# Altium footprint library RPI-Router.PcbLib: 49 footprints (part 1 of 4)
Each footprint in its own frame and in the unit in brackets; x right, y up, seen from the top. Pads: shape width x height; smd on the part's side, far side on the other; paste and mask are expansions set on the pad; w line width, h text height; cw(c..) or ccw(c..) is an arc to the next point about the centre after c.
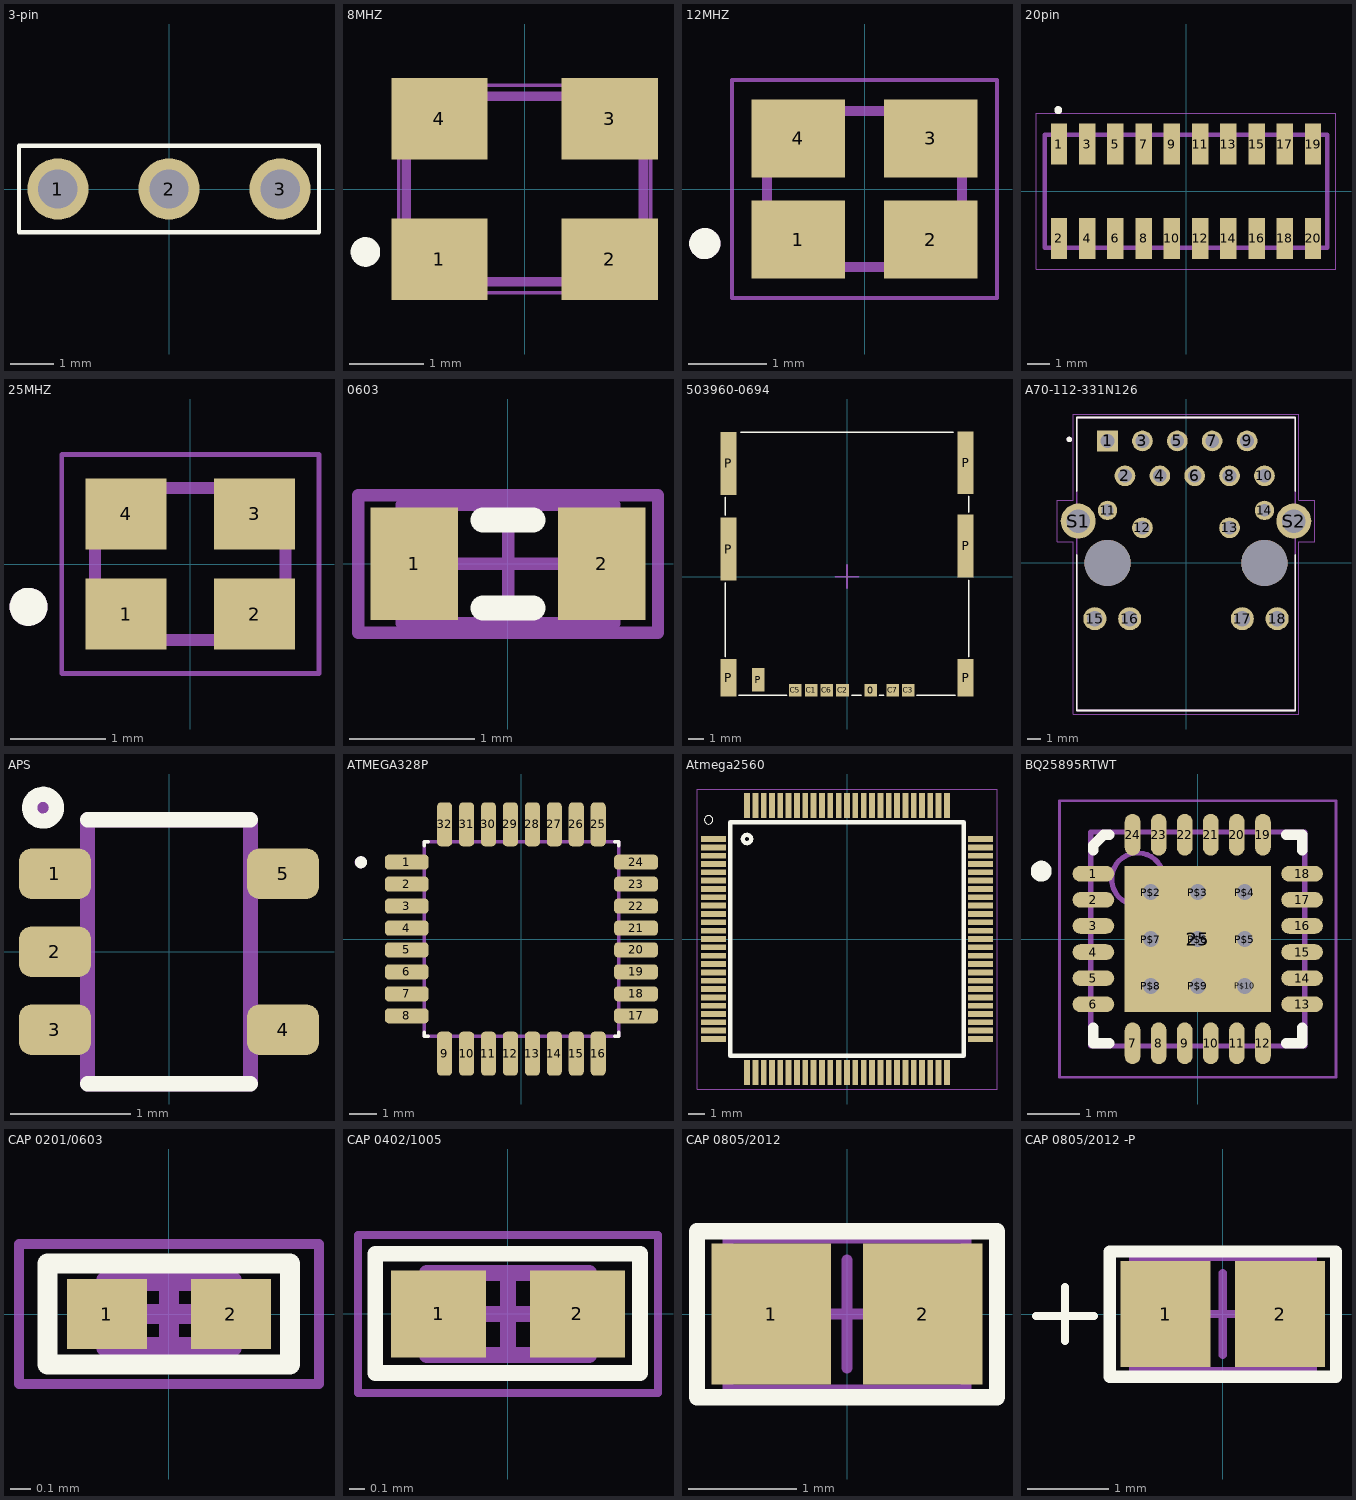
[diagram p0: the footprints below, top view; thin cyan lines are the x and y axes]

## 3-pin [mm]
pads (3):
  round 1.4 hole 0.9: 1(-2.54,0) 2(0,0) 3(2.54,0)
Top Overlay:
  lines w0.1: -3.429,-0.991 3.429,-0.991 3.429,0.991 -3.429,0.991 -3.429,-0.991
3D body "c-87220-3-k-3d.stp": height 10.48, standoff -3.06, extent -3.607,-1.168 3.607,1.168

## 8MHZ [mm]
pads (4):
  rect 1.3x1.1 smd: 1(-1.15,-0.95) 2(1.15,-0.95) 3(1.15,0.95) 4(-1.15,0.95)
Top Overlay:
  circle w0.2: c-2.15,-0.85 r0.1
Mechanical 13:
  lines w0.127: -1.6,-1.25 1.6,-1.25 1.6,1.25 -1.6,1.25 -1.6,-1.25
Mechanical 15:
  lines w0.05: -1.7,-1.4 1.7,-1.4 1.7,1.4 -1.7,1.4 -1.7,-1.4
3D body: height 0.5, standoff 0, extent -1.6,-1.25 1.6,1.25

## 12MHZ [mm]
pads (4):
  rect 1.2x1 smd: 1(-0.85,-0.65) 2(0.85,-0.65) 3(0.85,0.65) 4(-0.85,0.65)
Top Overlay:
  circle w0.2: c-2.05,-0.7 r0.1
Mechanical 13:
  circle w0.2: c-2.05,-0.7 r0.1
  lines w0.127: -1.25,-1 1.25,-1 1.25,1 -1.25,1 -1.25,-1
Mechanical 15:
  lines w0.05: -1.7,-1.4 1.7,-1.4 1.7,1.4 -1.7,1.4 -1.7,-1.4
3D body: height 0.5, standoff 0, extent -1.25,-1 1.25,1

## 20pin [mm]
pads (20):
  rect 0.74x1.85 smd: 1(-5.715,2.125) 2(-5.715,-2.125) 3(-4.445,2.125) 4(-4.445,-2.125) 5(-3.175,2.125) 6(-3.175,-2.125) 7(-1.905,2.125) 8(-1.905,-2.125) 9(-0.635,2.125) 10(-0.635,-2.125) 11(0.635,2.125) 12(0.635,-2.125) 13(1.905,2.125) 14(1.905,-2.125) 15(3.175,2.125) 16(3.175,-2.125) 17(4.445,2.125) 18(4.445,-2.125) 19(5.715,2.125) 20(5.715,-2.125)
Top Overlay:
  circle w0.254: c-5.75,3.65 r0.05
Mechanical 13:
  lines w0.2: -6.35,-2.55 6.35,-2.55 6.35,2.55 -6.35,2.55 -6.35,-2.55
Mechanical 15:
  lines w0.05: -6.75,-3.5 6.75,-3.5 6.75,3.5 -6.75,3.5 -6.75,-3.5
3D body "_ _ _B102VWQS-RC.STEP": height 5, standoff 0, extent -6.35,-2.5 6.35,2.6

## 25MHZ [mm]
pads (4):
  rect 0.85x0.75 smd: 1(-0.675,-0.525) 2(0.675,-0.525) 3(0.675,0.525) 4(-0.675,0.525)
Top Overlay:
  circle w0.2: c-1.7,-0.45 r0.1
Mechanical 13:
  circle w0.2: c-1.7,-0.45 r0.1
  lines w0.127: -1,-0.8 -1,0.8 1,0.8 1,-0.8 -1,-0.8
Mechanical 15:
  lines w0.05: -1.35,-1.15 -1.35,1.15 1.35,1.15 1.35,-1.15 -1.35,-1.15
3D body: height 1, standoff 0, extent -1,-0.8 1,0.8

## 0603 [mm]
pads (2):
  rect 0.7x0.9 smd: 1(-0.75,0) 2(0.75,0)
Top Overlay:
  lines w0.2: -0.2,-0.35 0.2,-0.35 ; -0.2,0.35 0.2,0.35
Mechanical 13:
  lines w0.1: -0.85,-0.475 0.85,-0.475 0.85,0.475 -0.85,0.475 -0.85,-0.475
Mechanical 15:
  lines w0.1: -0.475,0 0.475,0 ; 0,-0.475 0,0.475 ; -1.2,-0.55 1.2,-0.55 1.2,0.55 -1.2,0.55 -1.2,-0.55
3D body "User Library-RES_0603L.STEP": height 0.44, standoff -0.03, extent -0.8,-0.406 0.8,0.394

## 503960-0694 [mm] "1.42mm Height micro-SIM Card Connector, 1.00mm Pitch, Push-Push, SMT, Normal Mount, with Detect Switch, 6 Circuits"
pads (14):
  rect 0.8x0.8 smd: 0(1.5,-7.25) C1(-2.285,-7.25) C2(-0.285,-7.25) C3(3.905,-7.25) C5(-3.285,-7.25) C6(-1.285,-7.25) C7(2.905,-7.25)
  rect 1x2.4 smd: P(-7.55,-6.45) P(7.55,-6.45)
  rect 1x4 smd: P(-7.55,1.75) P(-7.55,7.2) P(7.55,1.95) P(7.55,7.25)
  rect 0.8x1.5 smd: P(-5.65,-6.579)
Top Overlay:
  lines w0.1: -7.75,-5.1 -7.75,-0.4 ; -7.75,3.9 -7.75,5.05 ; -6.9,-7.55 -3.85,-7.55 ; -6.75,9.2 6.75,9.2 ; 0.3,-7.55 0.9,-7.55 ; 2.05,-7.55 2.35,-7.55 ; 4.45,-7.55 6.9,-7.55 ; 7.75,-5.1 7.75,-0.25 ; 7.75,4.1 7.75,5.1
Mechanical 3:
  lines w0.1: -0.75,0 0.75,0 ; 0,-0.75 0,0 0,0.75
3D body "5039600694.stp": height 1.4, standoff -0.02, extent -7.75,-7.55 7.75,9.2

## A70-112-331N126 [mm]
pads (22):
  rect 1.508x1.508 hole 1: 1(-5.715,8.89)
  round 1.508 hole 1: 2(-4.445,6.35) 3(-3.175,8.89) 4(-1.905,6.35) 5(-0.635,8.89) 6(0.635,6.35) 7(1.905,8.89) 8(3.175,6.35) 9(4.445,8.89) 10(5.715,6.35) 12(-3.175,2.56) 13(3.175,2.56)
  round 1.408 hole 0.9: 11(-5.715,3.83) 14(5.715,3.83)
  round 1.68 hole 1.12: 15(-6.64,-4.06) 16(-4.1,-4.06) 17(4.1,-4.06) 18(6.64,-4.06)
  round 2.55 hole 1.7: S1(-7.85,3.05) S2(7.85,3.05)
  round 3.35 hole 3.35 unplated: ""(-5.715,0) ""(5.715,0)
Top Overlay:
  circle w0.2: c-8.5,9 r0.1
  lines w0.127: -7.95,0.6 -7.95,-10.75 7.95,-10.75 7.95,0.6 ; -7.95,5.25 -7.95,10.6 7.95,10.6 7.95,5.25
Mechanical 13:
  circle w0.2: c-8.5,9 r0.1
  lines w0.127: -7.95,-10.75 7.95,-10.75 7.95,10.6 -7.95,10.6 -7.95,-10.75
Mechanical 15:
  lines w0.05: -9.38,1.53 -9.38,4.57 -8.2,4.57 -8.2,10.85 8.2,10.85 8.2,4.57 9.38,4.57 9.38,1.53 8.2,1.53 8.2,-11 -8.2,-11 -8.2,1.53 -9.38,1.53

## APS [mm]
pads (5):
  rrect50% 0.6x0.42 smd: 1(-0.95,0.65) 2(-0.95,0) 3(-0.95,-0.65) 4(0.95,-0.65) 5(0.95,0.65)
Top Overlay:
  circle w0.127: c-1.05,1.2 r0.112
  lines w0.127: -0.68,-1.1 0.68,-1.1 ; -0.68,1.1 0.68,1.1
Mechanical 13:
  circle w0.2: c-1.05,1.2 r0.05
  lines w0.127: -0.68,-1.1 -0.68,1.1 0.68,1.1 0.68,-1.1 -0.68,-1.1
3D body: height 0.7, standoff 0, extent -0.68,-1.1 0.68,1.1

## ATMEGA328P [mm]
pads (32):
  rrect53% 1.6x0.55 smd: 1(-4.18,2.8) 2(-4.18,2) 3(-4.18,1.2) 4(-4.18,0.4) 5(-4.18,-0.4) 6(-4.18,-1.2) 7(-4.18,-2) 8(-4.18,-2.8) 17(4.18,-2.8) 18(4.18,-2) 19(4.18,-1.2) 20(4.18,-0.4) 21(4.18,0.4) 22(4.18,1.2) 23(4.18,2) 24(4.18,2.8)
  rrect53% 0.55x1.6 smd: 9(-2.8,-4.18) 10(-2,-4.18) 11(-1.2,-4.18) 12(-0.4,-4.18) 13(0.4,-4.18) 14(1.2,-4.18) 15(2,-4.18) 16(2.8,-4.18) 25(2.8,4.18) 26(2,4.18) 27(1.2,4.18) 28(0.4,4.18) 29(-0.4,4.18) 30(-1.2,4.18) 31(-2,4.18) 32(-2.8,4.18)
Top Overlay:
  circle w0.24: c-5.853,2.797 r0.1
  lines w0.127: -3.55,-3.4 -3.55,-3.55 -3.4,-3.55 ; -3.55,3.4 -3.55,3.55 -3.4,3.55 ; 3.4,-3.55 3.55,-3.55 3.55,-3.4 ; 3.4,3.55 3.55,3.55 3.55,3.4
Mechanical 13:
  circle w0.24: c-5.858,2.797 r0.1
  lines w0.127: -3.55,-3.55 3.55,-3.55 3.55,3.55 -3.55,3.55 -3.55,-3.55
3D body: height 1, standoff 0, extent -3.55,-3.55 3.55,3.55

## Atmega2560 [mm]
pads (100):
  rect 1.5x0.35 smd: 1(-8,6) 2(-8,5.5) 3(-8,5) 4(-8,4.5) 5(-8,4) 6(-8,3.5) 7(-8,3) 8(-8,2.5) 9(-8,2) 10(-8,1.5) 11(-8,1) 12(-8,0.5) 13(-8,0) 14(-8,-0.5) 15(-8,-1) 16(-8,-1.5) 17(-8,-2) 18(-8,-2.5) 19(-8,-3) 20(-8,-3.5) 21(-8,-4) 22(-8,-4.5) 23(-8,-5) 24(-8,-5.5) 25(-8,-6) 51(8,-6) 52(8,-5.5) 53(8,-5) 54(8,-4.5) 55(8,-4) 56(8,-3.5) 57(8,-3) 58(8,-2.5) 59(8,-2) 60(8,-1.5) 61(8,-1) 62(8,-0.5) 63(8,0) 64(8,0.5) 65(8,1) 66(8,1.5) 67(8,2) 68(8,2.5) 69(8,3) 70(8,3.5) 71(8,4) 72(8,4.5) 73(8,5) 74(8,5.5) 75(8,6)
  rect 0.35x1.5 smd: 26(-6,-8) 27(-5.5,-8) 28(-5,-8) 29(-4.5,-8) 30(-4,-8) 31(-3.5,-8) 32(-3,-8) 33(-2.5,-8) 34(-2,-8) 35(-1.5,-8) 36(-1,-8) 37(-0.5,-8) 38(0,-8) 39(0.5,-8) 40(1,-8) 41(1.5,-8) 42(2,-8) 43(2.5,-8) 44(3,-8) 45(3.5,-8) 46(4,-8) 47(4.5,-8) 48(5,-8) 49(5.5,-8) 50(6,-8) 76(6,8) 77(5.5,8) 78(5,8) 79(4.5,8) 80(4,8) 81(3.5,8) 82(3,8) 83(2.5,8) 84(2,8) 85(1.5,8) 86(1,8) 87(0.5,8) 88(0,8) 89(-0.5,8) 90(-1,8) 91(-1.5,8) 92(-2,8) 93(-2.5,8) 94(-3,8) 95(-3.5,8) 96(-4,8) 97(-4.5,8) 98(-5,8) 99(-5.5,8) 100(-6,8)
Top Overlay:
  circle w0: c-8.3,7.15 r0.254
  circle w0.254: c-6,6 r0.25
  lines w0.254: -7,-7 -7,7 7,7 7,-7 -7,-7
Mechanical 15:
  lines w0.05: -9,-9 -9,9 9,9 9,-9 -9,-9
3D body: height 1.2, standoff 0, extent -7,-7 7,7

## BQ25895RTWT [mm]
pads (34):
  oval 0.8x0.3 smd: 1(-2,1.25) 2(-2,0.75) 3(-2,0.25) 4(-2,-0.25) 5(-2,-0.75) 6(-2,-1.25) 13(2,-1.25) 14(2,-0.75) 15(2,-0.25) 16(2,0.25) 17(2,0.75) 18(2,1.25)
  oval 0.3x0.8 smd: 7(-1.25,-2) 8(-0.75,-2) 9(-0.25,-2) 10(0.25,-2) 11(0.75,-2) 12(1.25,-2) 19(1.25,2) 20(0.75,2) 21(0.25,2) 22(-0.25,2) 23(-0.75,2) 24(-1.25,2)
  rect 2.8x2.8 smd paste-2: 25(0,0)
  round 0.5 hole 0.3: P$2(-0.9,0.9) P$3(0,0.9) P$4(0.9,0.9) P$5(0.9,0) P$6(0,0) P$7(-0.9,0) P$8(-0.9,-0.9) P$9(0,-0.9) P$10(0.9,-0.9)
Top Overlay:
  circle w0.2: c-3,1.3 r0.1
  lines w0.2: -2,-1.7 -2,-2 -1.7,-2 ; -2,1.7 -2,1.8 -1.8,2 -1.7,2 ; 1.7,-2 2,-2 2,-1.7 ; 1.7,2 2,2 2,1.7
Top Paste:
  region: 0.885,-0.887 -0.887,-0.887 -0.887,0.885 0.885,0.885
Mechanical 13:
  circle w0.1: c-1.15,1.15 r0.5
  lines w0.1: -2.05,-2.05 2.05,-2.05 2.05,2.05 -2.05,2.05 -2.05,-2.05
Mechanical 15:
  lines w0.05: -2.65,-2.65 -2.65,2.65 2.65,2.65 2.65,-2.65 -2.65,-2.65
3D body: height 1, standoff 0.01, extent -2.05,-2.05 2.05,2.05

## CAP 0201/0603 [mm] "Chip Capacitor, 2-Leads, Body 0.60x0.30mm, IPC Medium Density"
height 0.33
pads (2):
  rect 0.4x0.35 smd: 1(-0.31,0) 2(0.31,0)
Top Overlay:
  lines w0.1: -0.608,-0.252 0.606,-0.252 0.606,0.253 -0.608,0.253 -0.608,-0.252
Mechanical 13:
  lines w0.1: -0.315,-0.165 -0.315,0.165 0.315,0.165 0.315,-0.165 -0.315,-0.165
Mechanical 15:
  lines w0.05: -0.75,-0.35 -0.75,0.35 0.75,0.35 0.75,-0.35 -0.75,-0.35
  lines w0.1: -0.165,0 0.165,0 ; 0,-0.165 0,0.165
3D body "CAP 0201.STEP": height 0.3, standoff 0, extent -0.3,-0.15 0.3,0.15

## CAP 0402/1005 [mm] "Chip Capacitor, 2-Leads, Body 1.02x0.51mm, IPC Medium Density"
height 0.52
pads (2):
  rect 0.6x0.55 smd: 1(-0.44,0) 2(0.44,0)
Top Overlay:
  lines w0.1: -0.841,-0.374 -0.841,-0.141 -0.841,0.382 0.836,0.382 0.836,-0.374 -0.841,-0.374
Mechanical 13:
  lines w0.1: -0.515,-0.26 0.515,-0.26 0.515,0.26 -0.515,0.26 -0.515,-0.26
Mechanical 15:
  lines w0.05: -0.95,-0.5 0.95,-0.5 0.95,0.5 -0.95,0.5 -0.95,-0.5
  lines w0.1: -0.26,0 0.26,0 ; 0,-0.26 0,0.26
3D body "0402 cap.STEP": height 0.52, standoff 0, extent -0.5,-0.262 0.5,0.262

## CAP 0805/2012 [mm] "Chip Capacitor, 2-Leads, Body 2.00x1.20mm, IPC High Density"
height 1.15
pads (2):
  rect 1.1x1.3 smd: 1(-0.7,0) 2(0.7,0)
Top Overlay:
  lines w0.15: -1.385,-0.769 1.385,-0.769 1.385,0.765 -1.385,0.765 -1.385,-0.769
Mechanical 13:
  lines w0.1: -1.1,-0.7 -1.1,0.7 1.1,0.7 1.1,-0.7 -1.1,-0.7
Mechanical 15:
  lines w0.05: -1.35,-0.8 -1.35,0.8 1.35,0.8 1.35,-0.8 -1.35,-0.8
  lines w0.1: -0.5,0 0.5,0 ; 0,-0.5 0,0.5
3D body "0805 cap.STEP": height 1.26, standoff -0.02, extent -1,-0.637 1,0.637

## CAP 0805/2012 -P [mm] "Chip Capacitor, 2-Leads, Body 2.00x1.20mm, IPC High Density"
height 1.15
pads (2):
  rect 1.1x1.3 smd: 1(-0.7,0) 2(0.7,0)
Top Overlay:
  lines w0.1: -2.286,-0.025 -1.575,-0.025 ; -1.93,-0.33 -1.93,0.33
  lines w0.15: -1.385,-0.769 -1.385,0.765 1.385,0.765 1.385,-0.769 -1.385,-0.769
Mechanical 13:
  lines w0.1: -1.1,-0.7 1.1,-0.7 1.1,0.7 -1.1,0.7 -1.1,-0.7
Mechanical 15:
  lines w0.05: -1.35,-0.8 1.35,-0.8 1.35,0.8 -1.35,0.8 -1.35,-0.8
  lines w0.1: -0.5,0 0.5,0 ; 0,-0.5 0,0.5
3D body "0805 cap.STEP": height 1.26, standoff -0.02, extent -1,-0.637 1,0.637